# Altium integrated library ERA6AEB203V.IntLib: 1 symbol
Pins are listed as number, name and electrical type; pins without a type are passive.

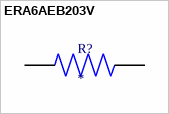
[diagram p0: symbol ERA6AEB203V]

## ERA6AEB203V
designator R?
MP: ERA6AEB203V; Availability: Unavailable; Price: None; Package: None; Value: *
footprint RES_ERA6AEB203V
pins: 1, 2